# Altium footprint library electrode.PcbLib: 2 footprints
Each footprint in its own frame and in the unit in brackets; x right, y up, seen from the top. Pads: shape width x height; smd on the part's side, far side on the other; paste and mask are expansions set on the pad; w line width, h text height; cw(c..) or ccw(c..) is an arc to the next point about the centre after c.
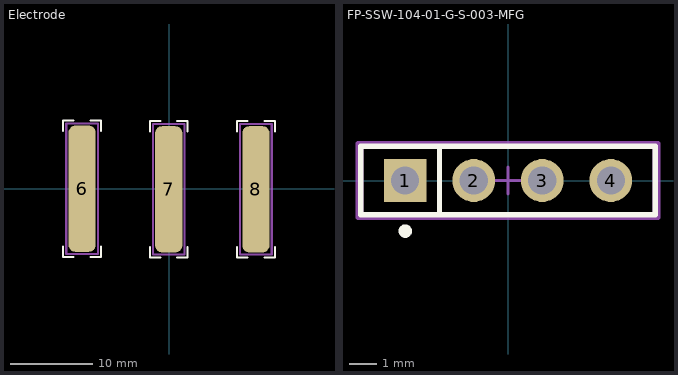
[diagram p0: the footprints below, top view; thin cyan lines are the x and y axes]

## Electrode [mil]
pads (3):
  rrect50% 130x600 smd paste-99999 mask+0: 6(-415,0) 7(-2.66,-2.5) 8(412.34,-2.5)
Top Overlay:
  lines w10: -505,-275 -505,-325 -455,-325 ; -505,275 -505,325 -455,325 ; -375,-325 -325,-325 -325,-275 ; -375,325 -325,325 -325,275 ; -92.66,-277.5 -92.66,-327.5 -42.66,-327.5 ; -92.66,272.5 -92.66,322.5 -42.66,322.5 ; 37.34,-327.5 87.34,-327.5 87.34,-277.5 ; 37.34,322.5 87.34,322.5 87.34,272.5 ; 322.34,-277.5 322.34,-327.5 372.34,-327.5 ; 322.34,272.5 322.34,322.5 372.34,322.5 ; 452.34,-327.5 502.34,-327.5 502.34,-277.5 ; 452.34,322.5 502.34,322.5 502.34,272.5
Top 3D Body:
  lines w10: -490,-310 -340,-310 -340,310 -490,310 -490,-310 ; -77.66,-312.5 72.34,-312.5 72.34,307.5 -77.66,307.5 -77.66,-312.5 ; 337.34,-312.5 487.34,-312.5 487.34,307.5 337.34,307.5 337.34,-312.5
3D body: height 30, standoff 0, extent 337.34,-312.5 487.34,307.5
3D body: height 30, standoff 0, extent -77.66,-312.5 72.34,307.5
3D body: height 30, standoff 0, extent -490,-310 -340,310

## FP-SSW-104-01-G-S-003-MFG [mm]
pads (4):
  rect 1.59x1.59 hole 1.04 paste-2539.97 mask+0: 1(-3.81,0)
  round 1.59 hole 1.04 paste-2539.97 mask+0: 2(-1.27,0) 3(1.27,0) 4(3.81,0)
Top Overlay:
  circle w0.25: c-3.81,-1.875 r0.125
  lines w0.2: -2.54,-1.27 -2.54,1.27 ; -5.46,-1.27 5.46,-1.27 5.46,1.27 -5.46,1.27 -5.46,-1.27
Top 3D Body:
  lines w0.2: -5.46,-1.27 5.46,-1.27 5.46,1.27 -5.46,1.27 -5.46,-1.27
Top Courtyard:
  lines w0.2: -5.56,-1.37 5.56,-1.37 5.56,1.37 -5.56,1.37 -5.56,-1.37
Top Assembly:
  lines w0.2: -5.56,-1.37 5.56,-1.37 5.56,1.37 -5.56,1.37 -5.56,-1.37
  text ".Designator" at 0,0.189 h1
Top Component Center:
  lines w0.1: -0.5,0 0.5,0 ; 0,-0.5 0,0.5
3D body "Conn_Samtec_SSW-104-01-G-S-003_eec.STEP": height 8.64, standoff -2.77, extent -5.335,-1.208 5.335,1.205